# Altium integrated library CST10T2CR.IntLib: 1 symbol
Pins are listed as number, name and electrical type; pins without a type are passive.

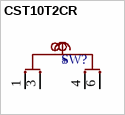
[diagram p0: symbol CST10T2CR]

## CST10T2CR
designator SW?  (value not drawn)
Toggle Switches. CST10T2CR; Manufacturer: CIT Relay and Switch; Component Type: Switches; Design Item ID: CST10T2CR; Value: *; JLCPCB Part #: C4949894; Manufacturer Part Number: CST10T2CR
footprint CST10T2CR (SW-TH_4P-L7.0-W4.7_CST10T2CR)
pins: 1, 3, 4, 6